# Altium footprint library FTP.PcbLib: 207 footprints (part 1 of 13)
Each footprint in its own frame and in the unit in brackets; x right, y up, seen from the top. Pads: shape width x height; smd on the part's side, far side on the other; paste and mask are expansions set on the pad; w line width, h text height; cw(c..) or ccw(c..) is an arc to the next point about the centre after c.
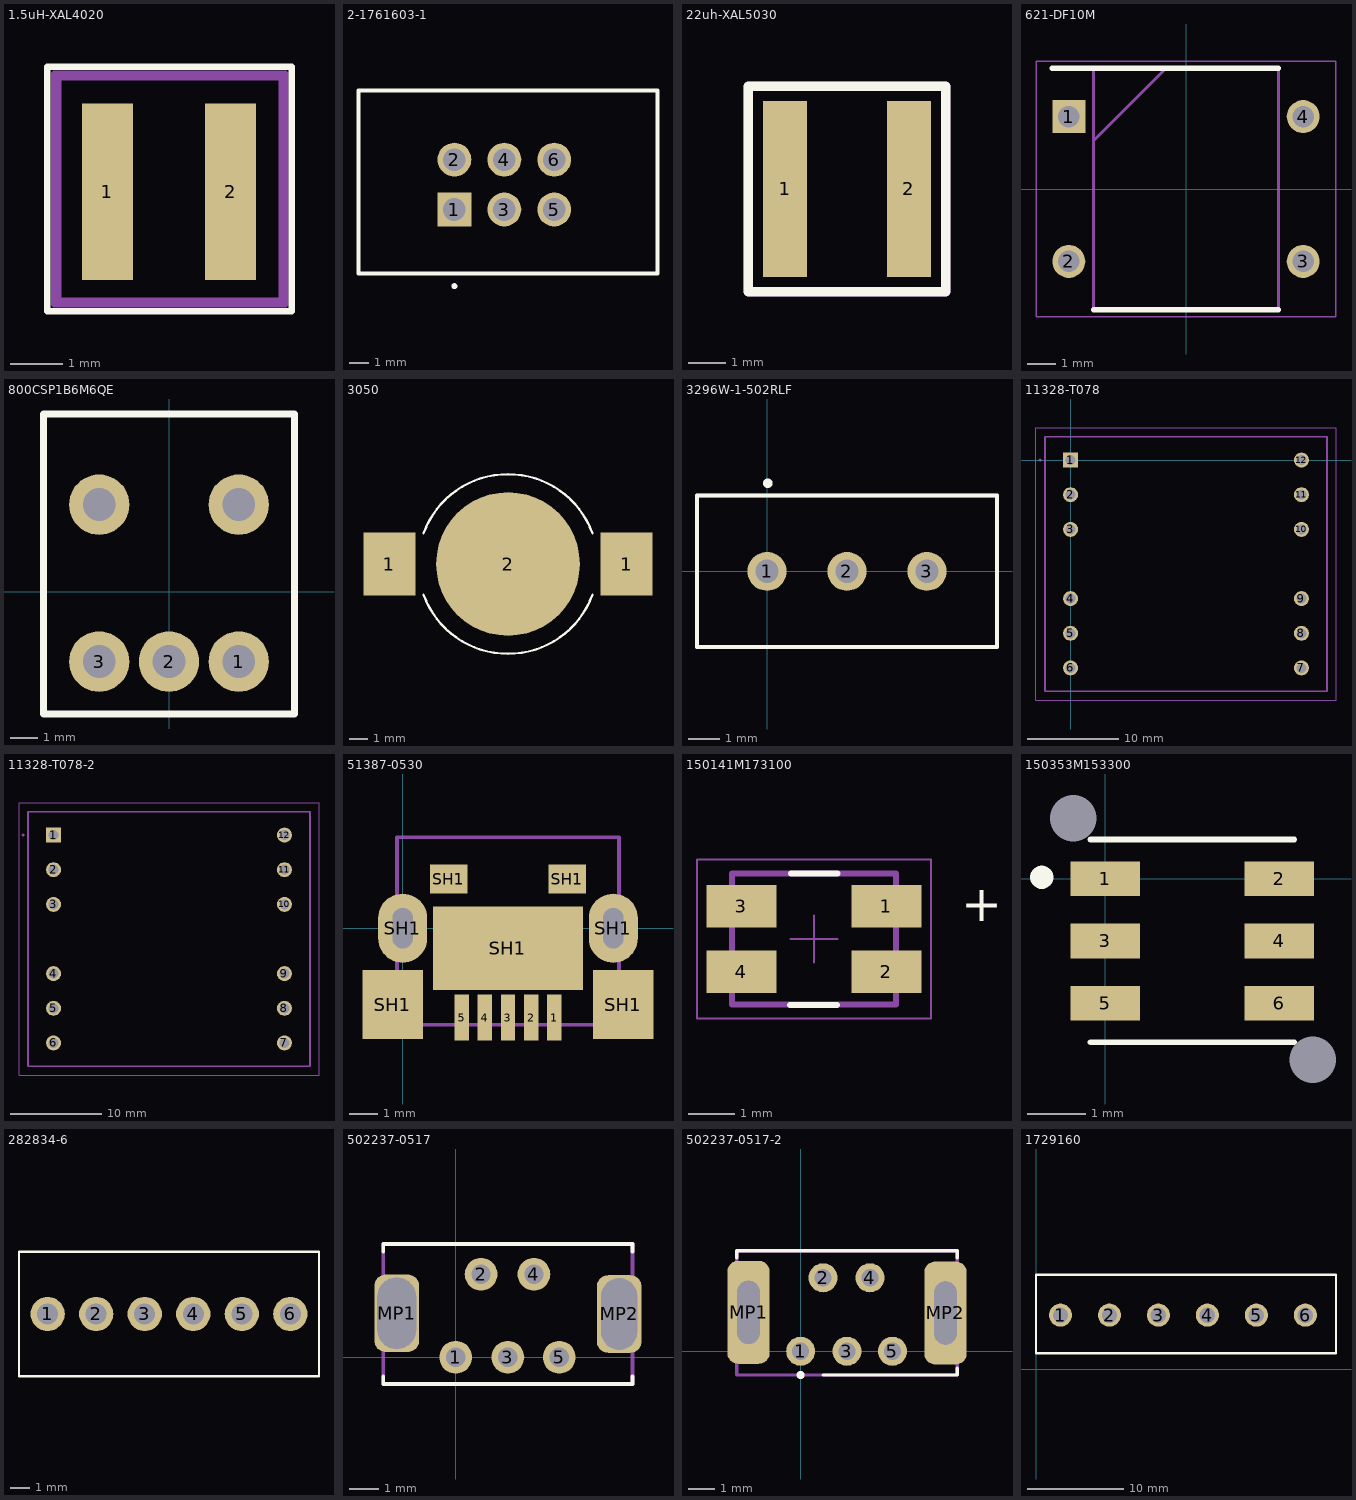
[diagram p0: the footprints below, top view; thin cyan lines are the x and y axes]

## 1.5uH-XAL4020 [mm]
pads (2):
  rect 0.98x3.4 smd: 1(1268.815,1270) 2(1271.185,1270)
Top Overlay:
  lines w0.127: 1267.659,1267.704 1272.362,1267.704 1272.362,1272.399 1267.659,1272.399 1267.659,1267.704
Mechanical 13:
  lines w0.127: 1267.865,1267.9 1272.165,1267.9 1272.165,1272.2 1267.865,1272.2 1267.865,1267.9
Mechanical 15:
  lines w0.127: 1267.795,1267.835 1267.795,1272.271 1272.233,1272.271 1272.233,1267.835 1267.795,1267.835
  text "+" at 1269.502,1269.24 h1.5
3D body "Coilcraft-XAL4020.step": height -0.4, standoff -2.5, extent 1267.8,1267.85 1272.1,1272.15

## 2-1761603-1 [mm]
pads (6):
  rect 1.725x1.725 hole 1.15: 1(1267.46,1268.73)
  round 1.725 hole 1.15: 2(1267.46,1271.27) 3(1270,1268.73) 4(1270,1271.27) 5(1272.54,1268.73) 6(1272.54,1271.27)
Top Overlay:
  circle w0.152: c1267.46,1264.825 r0.076
  lines w0.2: 1262.575,1265.475 1262.575,1274.8 1277.8,1274.8 1277.8,1265.475 1262.575,1265.475
Mechanical 13:
  lines w0.1: 1262.56,1265.49 1262.56,1274.8 1277.8,1274.8 1277.8,1265.49 1262.56,1265.49
Mechanical 15:
  lines w0.05: 1262.55,1273.255 1262.55,1265.475 1277.825,1265.475 1277.825,1274.8 1264.99,1274.8
3D body "c-2-1761603-1-a-3d.stp": height 9, standoff -2.81, extent 1262.56,1265.49 1277.8,1274.71

## 22uh-XAL5030 [mm]
pads (2):
  rect 1.18x4.7 smd: 1(1268.345,1270) 2(1271.655,1270)
Top Overlay:
  lines w0.254: 1267.36,1267.26 1272.64,1267.26 1272.64,1272.74 1267.36,1272.74 1267.36,1267.26
Mechanical 15:
  lines w0.254: 1267.36,1267.26 1267.36,1272.74 1272.64,1272.74 1272.64,1267.26 1267.36,1267.26
3D body "Coilcraft-XAL5030.STEP": height 3, standoff -0.1, extent 1267.23,1267.2 1272.71,1272.88

## 621-DF10M [mm]
pads (4):
  rect 1.16x1.16 / inner round 1.16 / far side rect 1.16x1.16 hole 0.76: 1(-4.125,2.55)
  round 1.16 hole 0.76: 2(-4.125,-2.55) 3(4.125,-2.55) 4(4.125,2.55)
Top Overlay:
  lines w0.2: -4.705,4.25 3.25,4.25 ; -3.25,-4.25 3.25,-4.25
Mechanical 15:
  lines w0.1: -3.25,1.7 -0.7,4.25 ; -3.25,-4.25 -3.25,4.25 3.25,4.25 3.25,-4.25 -3.25,-4.25
Mechanical 20:
  lines w0.05: -5.28,-4.5 -5.28,4.5 5.28,4.5 5.28,-4.5 -5.28,-4.5
3D body "DF10M.stp": height 4.63, standoff -3.5, extent -4.165,-4.175 4.365,4.175

## 800CSP1B6M6QE [mm]
pads (5):
  round 2.2 hole 1.2: 1(2.54,-2.54) 2(0,-2.54) 3(-2.54,-2.54) ""(-2.54,3.175) ""(2.54,3.175)
Top Overlay:
  lines w0.254: -4.572,-4.445 4.572,-4.445 4.572,6.477 -4.572,6.477 -4.572,-4.445
3D body "800CSP1B6M6xE.stp": height 6.35, standoff -3.3, extent -4.05,-3.041 4.05,16.689

## 3050 [mm]
pads (3):
  rect 2.9x3.5 smd mask+0.05: 1(1263.4,1270) 1(1276.6,1270)
  round 8 smd mask+0.05: 2(1270,1270)
Top Overlay:
  lines w0.127: 1265.302,1268.29 ccw(c1270,1270) 1274.698,1268.29 ; 1265.302,1271.71 cw(c1270,1270) 1274.698,1271.71
3D body "keystone-PN3050.STEP": height 2.95, standoff 0, extent 1261.948,1265.392 1278.053,1274
3D body "CR1025.STEP": height 2.5, standoff 0, extent 1265,1265 1275,1275

## 3296W-1-502RLF [mm]
pads (3):
  round 1.24 hole 0.74: 1(0,0) 2(2.54,0) 3(5.08,0)
Top Overlay:
  circle w0.152: c0.025,2.8 r0.076
  lines w0.127: -2.225,-2.41 7.305,-2.41 7.305,2.41 -2.225,2.41 -2.225,-2.41
Mechanical 15:
  lines w0.127: -2.225,-2.41 7.305,-2.41 7.305,2.41 -2.225,2.41 -2.225,-2.41
3D body "User Library-bourns 3296 pot.STEP": height 11.8, standoff -6.15, extent -2.225,-2.369 7.305,2.462

## 11328-T078 [mm]
pads (12):
  rect 1.65x1.65 / inner round 1.524 / far side rect 1.65x1.65 hole 1.1: 1(0,0)
  round 1.65 hole 1.1: 2(0,-3.81) 3(0,-7.62) 4(0,-15.24) 5(0,-19.05) 6(0,-22.86) 7(25.4,-22.86) 8(25.4,-19.05) 9(25.4,-15.24) 10(25.4,-7.62) 11(25.4,-3.81) 12(25.4,0)
3D Body Bottom:
  lines w0.2: -3.4,0 ccw(c-3.35,0) -3.3,0 ; -3.4,0 cw(c-3.35,0) -3.3,0 ; -3.4,0 -3.3,0 ; -2.8,-25.43 28.2,-25.43 28.2,2.57 -2.8,2.57 -2.8,-25.43
Bottom Assembly:
  lines w0.1: -3.8,-26.43 29.2,-26.43 29.2,3.57 -3.8,3.57 -3.8,-26.43 ; -2.8,-25.43 28.2,-25.43 28.2,2.57 -2.8,2.57 -2.8,-25.43
3D body "PQ-26-20_6+6_tx.step": height 5.1, standoff -21.54, extent -2.195,-25.014 27.305,2.286

## 11328-T078-2 [mm]
pads (12):
  rect 1.65x1.65 / inner round 0 / far side rect 1.65x1.65 hole 1.1: 1(1270,1270)
  round 1.65 / inner round 0 / far side round 1.65 hole 1.1: 2(1270,1266.19) 3(1270,1262.38) 4(1270,1254.76) 5(1270,1250.95) 6(1270,1247.14) 7(1295.4,1247.14) 8(1295.4,1250.95) 9(1295.4,1254.76) 10(1295.4,1262.38) 11(1295.4,1266.19) 12(1295.4,1270)
Assembly Bottom:
  lines w0.1: 1266.2,1243.57 1299.2,1243.57 1299.2,1273.57 1266.2,1273.57 1266.2,1243.57 ; 1267.2,1244.57 1298.2,1244.57 1298.2,1272.57 1267.2,1272.57 1267.2,1244.57
3D Body Bottom:
  lines w0.2: 1266.6,1270 ccw(c1266.65,1270) 1266.7,1270 ; 1266.6,1270 cw(c1266.65,1270) 1266.7,1270 ; 1266.6,1270 1266.7,1270 ; 1267.2,1244.57 1298.2,1244.57 1298.2,1272.57 1267.2,1272.57 1267.2,1244.57
3D body "PQ-26-20_6+6_tx.step": height 5.36, standoff -21.28, extent 1267.805,1244.986 1297.305,1272.286

## 51387-0530 [mm]
pads (12):
  rect 0.5x1.6 smd mask+0.07: 1(5.25,-3.1) 2(4.45,-3.1) 3(3.65,-3.1) 4(2.85,-3.1) 5(2.05,-3.1)
  rect 2.1x2.4 smd mask+0.07: SH1(-0.35,-2.65) SH1(7.65,-2.65)
  rrect100% 1.7x2.4 hole 0.7 slot 1.4 at 90 deg mask+0.07: SH1(0,0) SH1(7.3,0)
  rect 1.3x1 smd mask+0.07: SH1(1.6,1.7) SH1(5.7,1.7)
  rect 5.2x2.9 smd mask+0.07: SH1(3.65,-0.7)
Mechanical 1:
  lines w0.127: -0.2,-3.35 -0.2,3.15 7.5,3.15 7.5,-3.35 -0.2,-3.35
3D body "513870530.stp": height 4.05, standoff -0.6, extent -0.9,-3.55 8.2,3.15

## 150141M173100 [mm]
height 2.1
pads (4):
  rect 1.5x0.9 smd: 1(1271.55,1270.7) 2(1271.55,1269.3) 3(1268.45,1270.7) 4(1268.45,1269.3)
Top Overlay:
  lines w0.127: 1269.491,1268.593 1270.491,1268.593 ; 1269.507,1271.403 1270.507,1271.403
  text "+" at 1273.15,1270.375 h0.76
Mechanical 13:
  lines w0.127: 1268.25,1268.6 1268.25,1271.4 1271.75,1271.4 1271.75,1268.6 1268.25,1268.6
Mechanical 15:
  lines w0.05: 1269.5,1270 1270.5,1270 ; 1270,1269.5 1270,1270.5 ; 1267.5,1268.3 1272.5,1268.3 1272.5,1271.7 1267.5,1271.7 1267.5,1268.3
3D body "150141xxx.stp": height 1.9, standoff 0, extent 1268.25,1268.6 1271.75,1271.4

## 150353M153300 [mm]
pads (8):
  rect 1.2x0.6 smd: 1(0,0) 2(3,0) 3(0,-1.075) 4(3,-1.075) 5(0,-2.15) 6(3,-2.15)
  round 0 hole 0.8: 8(-0.559,1.041) 8(3.581,-3.124)
Top Overlay:
  lines w0.1: -0.26,-2.825 3.26,-2.825 ; -0.26,0.675 3.26,0.675
  lines w0.2: -1.1,-0.075 cw(c-1.1,0.025) -1.1,0.125 cw(c-1.1,0.025) -1.1,-0.075
3D body "150352M173300_Download_Step_150352M173300_rev1.stp": height 1.65, standoff -0.14, extent -0.212,-2.424 3.288,0.376
3D body "VLP-350-R.STEP": height 8.89, standoff -1.52, extent -0.851,-3.378 3.848,1.321

## 282834-6 [mm]
pads (6):
  round 1.8 hole 1.1 mask+0.05: 1(1263.65,1270) 2(1266.19,1270) 3(1268.73,1270) 4(1271.27,1270) 5(1273.81,1270) 6(1276.35,1270)
Top Overlay:
  lines w0.127: 1262.15,1266.75 1277.85,1266.75 1277.85,1273.25 1262.15,1273.25 1262.15,1266.75

## 502237-0517 [mm]
pads (7):
  round 1.1 hole 0.65: 1(0,0) 2(0.85,2.783) 3(1.75,0) 4(2.625,2.783) 5(3.475,0)
  rrect50% 1.5x2.6 hole 2.4 slot 1.3 at 0 deg: MP1(-1.975,1.475)
  rrect50% 1.5x2.6 hole 2.4 slot 1.2 at 0 deg: MP2(5.484,1.45)
Top Overlay:
  lines w0.127: -2.425,-0.646 -2.425,-0.9 5.925,-0.9 5.925,-0.646 ; -2.425,3.545 -2.425,3.8 5.925,3.8 5.925,3.545
Mechanical 15:
  lines w0.127: -2.425,-0.9 -2.425,3.8 5.925,3.8 5.925,-0.9 -2.425,-0.9
3D body "5022370517.stp": height 7.9, standoff -2.7, extent -2.425,-0.9 5.925,3.8

## 502237-0517-2 [mm]
pads (7):
  round 1.1 hole 0.65: 1(0,0) 2(0.85,2.783) 3(1.75,0) 4(2.625,2.783) 5(3.475,0)
  rrect50% 1.6x3.9 hole 2.4 slot 0.85 at 0 deg: MP1(-1.975,1.475) MP2(5.484,1.45)
Top Overlay:
  circle w0.152: c0,-0.9 r0.076
  lines w0.127: -2.425,3.545 -2.425,3.8 5.925,3.8 5.925,3.545 ; 0.85,-0.9 5.925,-0.9 5.925,-0.646
Mechanical 15:
  lines w0.127: -2.425,-0.9 5.925,-0.9 5.925,3.8 -2.425,3.8 -2.425,-0.9
3D body "5022370517.stp": height 7.9, standoff -2.7, extent -2.425,-0.9 5.925,3.8

## 1729160 [mm]
pads (6):
  round 2.4 hole 1.6: 1(2.54,5.6) 2(7.62,5.6) 3(12.7,5.6) 4(17.78,5.6) 5(22.86,5.6) 6(27.94,5.6)
Top Overlay:
  lines w0.254: 0,1.651 31.115,1.651 31.115,9.779 0,9.779 0,1.651
3D body "17432.stp": height 10, standoff -3.5, extent -0.031,1.651 31.019,9.751